# Altium footprint library FTP.PcbLib: 207 footprints (part 13 of 13)
Each footprint in its own frame and in the unit in brackets; x right, y up, seen from the top. Pads: shape width x height; smd on the part's side, far side on the other; paste and mask are expansions set on the pad; w line width, h text height; cw(c..) or ccw(c..) is an arc to the next point about the centre after c.
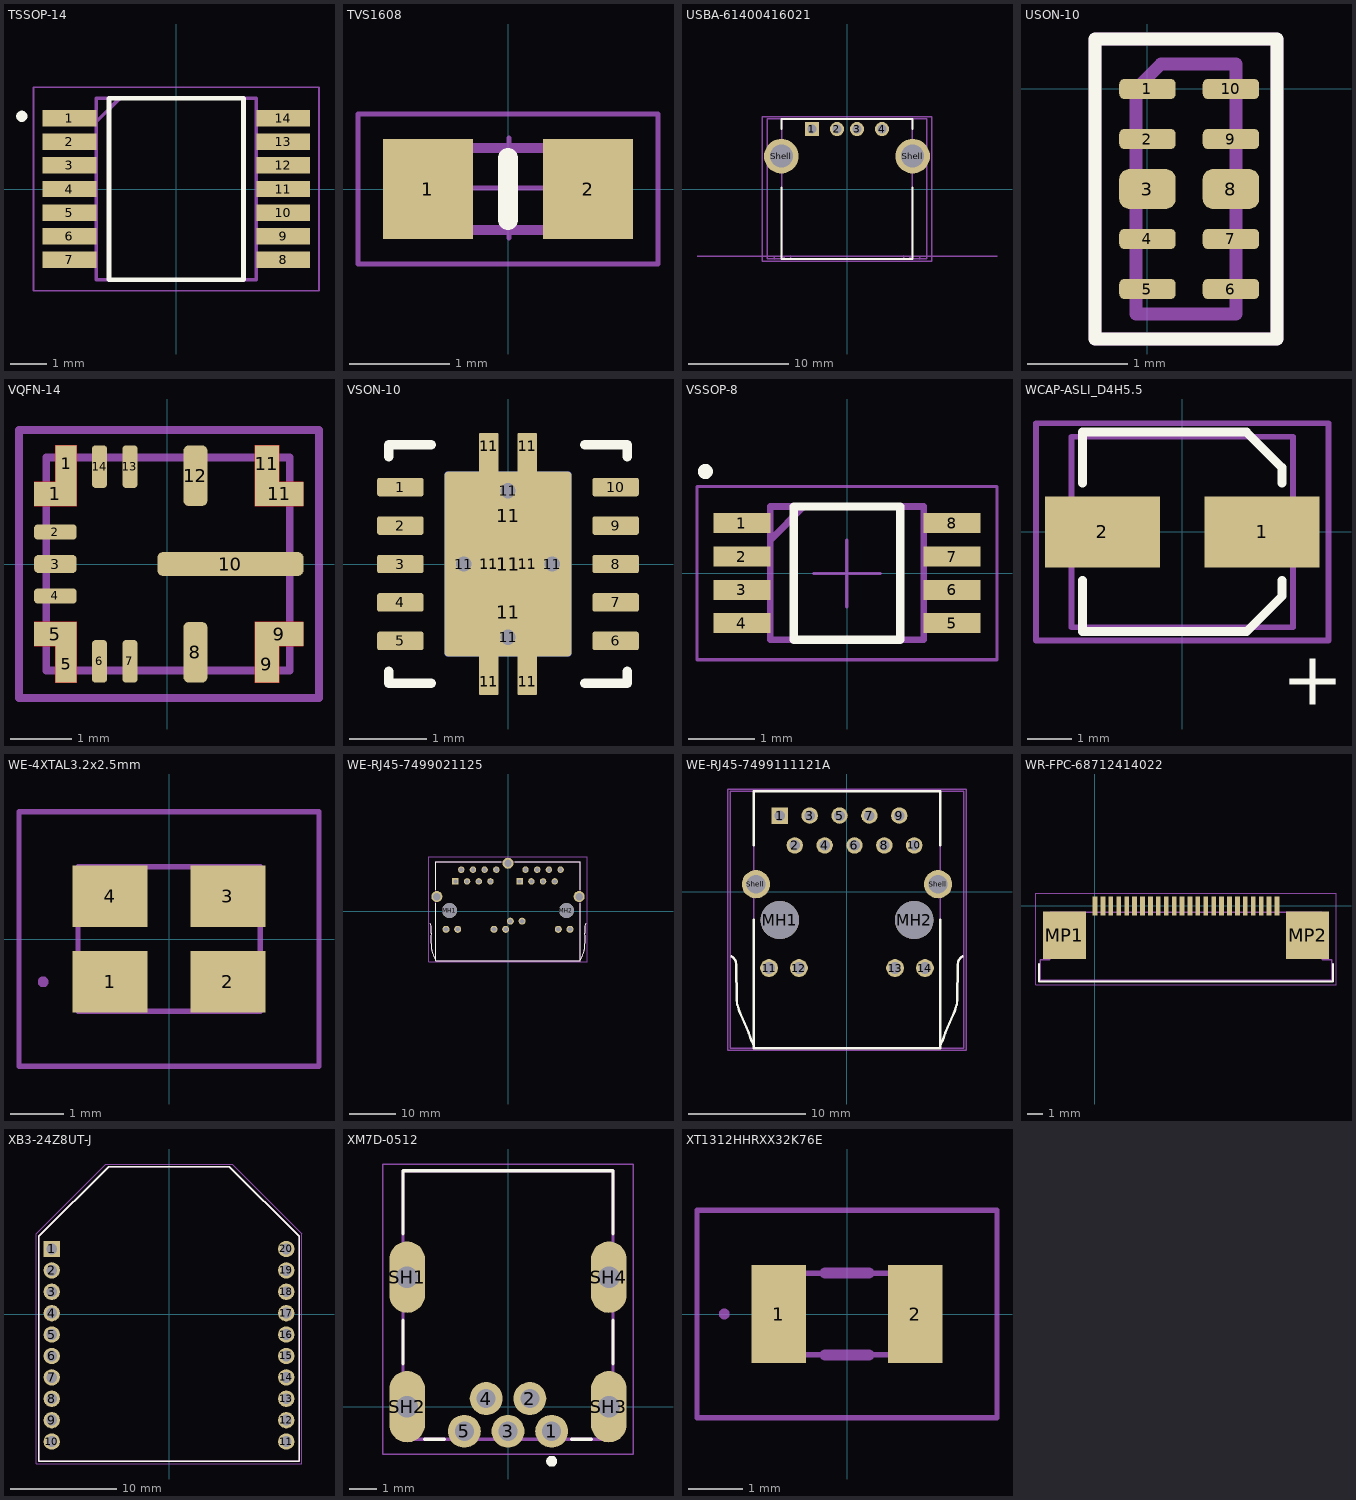
[diagram p12: the footprints below, top view; thin cyan lines are the x and y axes]

## TSSOP-14 [mm]
pads (14):
  rect 1.475x0.45 smd: 1(-2.938,1.95) 2(-2.938,1.3) 3(-2.938,0.65) 4(-2.938,0) 5(-2.938,-0.65) 6(-2.938,-1.3) 7(-2.938,-1.95) 8(2.938,-1.95) 9(2.938,-1.3) 10(2.938,-0.65) 11(2.938,0) 12(2.938,0.65) 13(2.938,1.3) 14(2.938,1.95)
Top Overlay:
  circle w0.152: c-4.25,2 r0.076
  lines w0.127: -1.85,-2.5 1.85,-2.5 1.85,2.5 -1.85,2.5 -1.85,-2.5
Mechanical 13:
  lines w0.1: -2.2,1.85 -1.55,2.5 ; -2.2,-2.5 2.2,-2.5 2.2,2.5 -2.2,2.5 -2.2,-2.5
Mechanical 15:
  lines w0.05: -3.925,-2.8 3.925,-2.8 3.925,2.8 -3.925,2.8 -3.925,-2.8
3D body "OP462HRUZ-REEL.stp": height 1.2, standoff 0, extent -3.2,-2.5 3.2,2.5

## TVS1608 [mm]
pads (2):
  rect 0.9x1 smd: 1(-0.8,0) 2(0.8,0)
Top Overlay:
  lines w0.2: 0,-0.312 0,0.312
Mechanical 13:
  lines w0.1: -0.8,-0.412 -0.8,0.412 0.8,0.412 0.8,-0.412 -0.8,-0.412
Mechanical 15:
  lines w0.05: -0.488,0.01 0.512,0.01 ; 0.012,-0.49 0.012,0.51 ; -1.5,-0.75 -1.5,0.75 1.5,0.75 1.5,-0.75 -1.5,-0.75
3D body "PESD0603-240.stp": height 0.55, standoff 0, extent -0.8,-0.412 0.8,0.413

## USBA-61400416021 [mm]
height 6.9
pads (6):
  rect 1.42x1.42 hole 0.92: 1(-3.5,5.99)
  round 1.42 hole 0.92: 2(-1,5.99) 3(1,5.99) 4(3.5,5.99)
  round 3.45 hole 2.3: Shell(-6.57,3.28) Shell(6.57,3.28)
Top Overlay:
  lines w0.2: -6.55,0.15 -6.55,-7 6.55,-7 6.55,0.15 ; -6.55,5.99 -6.55,7 6.55,7 6.55,5.99
  text "." at -3.5,8.1 h0.76
3D Body Top:
  lines w0.127: -15,-6.7 15,-6.7
Mechanical 13:
  lines w0.127: -7.25,-7 -6.56,-7 ccw(c-6.55,-6.7) -6.25,-6.7 -5.65,-6.7 -5.65,-7 5.65,-7 5.65,-6.7 6.25,-6.7 ccw(c6.55,-6.7) 6.56,-7 7.25,-7 7.25,-6.7 6.55,-6.7 6.55,7 -6.55,7 -6.55,-6.7 -7.25,-6.7 -7.25,-7
Mechanical 15:
  lines w0.127: -8.495,-7.2 8.495,-7.2 8.495,7.2 -8.495,7.2 -8.495,-7.2 ; -6.55,-7 6.55,-7 6.55,7 -6.55,7 -6.55,-7
  text "+" at -0.493,-0.767 h1.5
Mechanical 16:
  lines w0.127: -7.999,-7 7.999,-7 7.999,7 -7.999,7 -7.999,-7
3D body "61400416021.stp": height 7.63, standoff -4.06, extent -7.999,-7 7.999,7

## USON-10 [mm]
pads (10):
  rrect50% 0.565x0.2 smd mask+0.07: 1(0,0) 2(0,-0.5) 4(0,-1.5) 5(0,-2) 6(0.835,-2) 7(0.835,-1.5) 9(0.835,-0.5) 10(0.835,0)
  rrect50% 0.565x0.4 smd mask+0.07: 3(0,-1) 8(0.835,-1)
Top Overlay:
  lines w0.127: -0.525,-2.5 -0.525,0.5 1.295,0.5 1.295,-2.5 -0.525,-2.5
  text "." at -1.1,-0.1 h0.5
Mechanical 13:
  lines w0.127: -0.115,-2.25 0.885,-2.25 0.885,0.25 0.135,0.25 -0.115,0 -0.115,-2.25
Mechanical 15:
  lines w0.127: -0.525,-2.5 -0.525,0.5 1.295,0.5 1.295,-2.5 -0.525,-2.5
3D body "User Library-UDFN10.STEP": height 0.54, standoff -0.01, extent -0.079,-2.263 0.931,0.237

## VQFN-14 [mm]
pads (18):
  rect 0.7x0.4 smd paste-403.566 mask-403.566: 1(-1.837,1.15) 5(-1.837,-1.15)
  rect 0.35x0.6 smd paste-403.566 mask-403.566: 1(-1.662,1.65) 5(-1.662,-1.65)
  rrect50% 0.7x0.25 smd mask+0.07: 2(-1.837,0.525) 4(-1.837,-0.525)
  rrect50% 0.7x0.3 smd mask+0.07: 3(-1.837,0)
  rrect50% 0.25x0.7 smd mask+0.07: 6(-1.112,-1.6) 7(-0.612,-1.6) 13(-0.612,1.6) 14(-1.112,1.6)
  rrect50% 0.4x1 smd mask+0.07: 8(0.463,-1.45) 12(0.463,1.45)
  rect 0.4x0.6 smd paste-403.566 mask-403.566: 9(1.638,-1.65) 11(1.638,1.65)
  rect 0.8x0.4 smd paste-403.566 mask-403.566: 9(1.838,-1.15) 11(1.838,1.15)
  rrect50% 2.4x0.4 smd mask+0.07: 10(1.038,0)
Top Layer:
  region: -1.488,-1.951 -1.838,-1.951 -1.839,-1.351 -2.187,-1.351 -2.188,-0.951 -1.488,-0.951
  region: 1.436,-1.951 1.835,-1.951 1.836,-1.95 1.836,-1.351 2.235,-1.351 2.236,-1.351 2.236,-0.951 1.436,-0.951
  region: 1.436,1.951 1.835,1.951 1.836,1.95 1.836,1.351 2.235,1.351 2.236,1.351 2.236,0.951 1.436,0.951
  region: -1.488,1.951 -1.838,1.951 -1.839,1.351 -2.187,1.351 -2.188,0.951 -1.488,0.951
Top Overlay:
  text "." at -3.36,1.427 h0.76
Mechanical 13:
  lines w0.127: -1.987,-1.75 -1.987,1.75 2.012,1.75 2.012,-1.75 -1.987,-1.75
Mechanical 15:
  lines w0.127: -2.436,-2.2 -2.436,2.2 2.492,2.2 2.492,-2.2 -2.436,-2.2
  text "+" at -0.501,-0.752 h1.5
3D body "LM62435CPPQRJRRQ1.stp": height 1.1, standoff 0, extent -1.987,-1.75 2.012,1.75

## VSON-10 [mm]
pads (24):
  rrect20% 0.6x0.24 smd mask+0.07: 1(-1.4,1) 2(-1.4,0.5) 3(-1.4,0) 4(-1.4,-0.5) 5(-1.4,-1) 6(1.4,-1) 7(1.4,-0.5) 8(1.4,0) 9(1.4,0.5) 10(1.4,1)
  round 0.3 hole 0.2 mask+0.07: 11(-0.575,0) 11(0,-0.95) 11(0,0.95) 11(0.575,0)
  rrect5% 0.25x0.34 on Top Paste mask+0.07: 11(-0.25,-1.53) 11(-0.25,1.53) 11(0.25,-1.53) 11(0.25,1.53)
  rrect5% 0.25x3.4 smd paste-5 mask+0.07: 11(-0.25,0) 11(0.25,0)
  rrect5% 1.5x1.06 on Top Paste mask+0.07: 11(0,-0.63) 11(0,0.63)
  rrect5% 1.65x2.4 smd paste-5 mask+0.07: 11(0,0)
  rrect5% 1.65x2.4 smd far side paste-5 mask+0.07: 11(0,0)
Top Overlay:
  lines w0.127: -1.55,-1.396 -1.55,-1.55 -1,-1.55 ; -1.55,1.396 -1.55,1.55 -1,1.55 ; 1,-1.55 1.55,-1.55 1.55,-1.396 ; 1,1.55 1.55,1.55 1.55,1.396
3D body "User Library-PVSON-10-1.step": height 0.9, standoff 0, extent -1.501,-1.501 1.501,1.501

## VSSOP-8 [mm]
pads (8):
  rect 0.85x0.3 smd: 1(-1.575,0.75) 2(-1.575,0.25) 3(-1.575,-0.25) 4(-1.575,-0.75) 5(1.575,-0.75) 6(1.575,-0.25) 7(1.575,0.25) 8(1.575,0.75)
Top Overlay:
  circle w0.127: c-2.125,1.525 r0.05
  lines w0.127: -0.8,-1 0.8,-1 0.8,1 -0.8,1 -0.8,-1
Mechanical 13:
  lines w0.1: -1.15,0.5 -0.65,1 ; -1.15,-1 1.15,-1 1.15,1 -1.15,1 -1.15,-1
Mechanical 15:
  lines w0.05: -0.503,-0.005 0.497,-0.005 ; -0.003,-0.505 -0.003,0.495 ; -2.25,-1.3 2.25,-1.3 2.25,1.3 -2.25,1.3 -2.25,-1.3
3D body "SN74LVC3G07DCUR.stp": height 0.9, standoff 0, extent -1.55,-1 1.55,1

## WCAP-ASLI_D4H5.5 [mm]
height 5.5
pads (2):
  rect 2.6x1.6 smd: 1(1.8,0) 2(-1.8,0)
Top Overlay:
  lines w0.2: -2.25,-1.1 -2.25,-2.25 1.45,-2.25 2.25,-1.45 2.25,-1.1 ; -2.25,1.1 -2.25,2.25 1.45,2.25 2.25,1.45 2.25,1.1
  text "+" at 2.25,-3.9 h1.22
Mechanical 13:
  lines w0.127: -2.5,-2.15 -2.5,2.15 2.5,2.15 2.5,-2.15 -2.5,-2.15
Mechanical 15:
  lines w0.127: -3.3,-2.45 3.3,-2.45 3.3,2.45 -3.3,2.45 -3.3,-2.45
  text "+" at -0.508,-0.751 h1.5
3D body "4x5.5x1.stp": height 5.5, standoff 0, extent -2.5,-2.15 2.5,2.15

## WE-4XTAL3.2x2.5mm [mil]
pads (4):
  rect 55.12x45.28 smd: 1(-43.31,-31.5) 2(43.31,-31.5) 3(43.31,31.5) 4(-43.31,31.5)
Assembly Bottom:
  lines w3.94: -110.24,-93.5 110.24,-93.5 110.24,93.5 -110.24,93.5 -110.24,-93.5 ; -66.93,-53.15 66.93,-53.15 66.93,53.15 -66.93,53.15 -66.93,-53.15
3D Body Bottom:
  lines w3.94: -94.49,-31.5 ccw(c-92.52,-31.5) -90.55,-31.5 ccw(c-92.52,-31.5) -94.49,-31.5

## WE-RJ45-7499021125 [mm]
height 15.21
pads (29):
  rect 1.4x1.4 hole 0.89: A1(-11.43,6.5) B1(2.54,6.5)
  round 1.4 hole 0.89: A2(-10.16,9.04) A3(-8.89,6.5) A4(-7.62,9.04) A5(-6.35,6.5) A6(-5.08,9.04) A7(-3.81,6.5) A8(-2.54,9.04) B2(3.81,9.04) B3(5.08,6.5) B4(6.35,9.04) B5(7.62,6.5) B6(8.89,9.04) B7(10.16,6.5) B8(11.43,9.04)
  round 1.52 hole 1.02: A9(-13.47,-3.91) A10(-10.93,-3.91) A11(-3.05,-3.91) A12(-0.51,-3.91) B9(0.51,-2.14) B10(3.05,-2.14) B11(10.93,-3.91) B12(13.47,-3.91)
  round 3.25 hole 3.25 unplated: MH1(-12.7,0.15) MH2(12.7,0.15)
  round 2.4 hole 1.63: Shell(-15.465,3.2) Shell(0,10.44) Shell(15.465,3.2)
Top Overlay:
  lines w0.2: -16.862,-2.641 cw(c-17.973,-3.253) -16.706,-3.31 -16.713,-4.722 ccw(c-13.098,-5.162) -16.74,-5.192 ccw(c7.924,-6.02) -16.669,-8.064 ccw(c-8.25,-6.545) -15.7,-10.75 ; -15.7,1.7 -15.7,-10.75 ; -15.7,4.7 -15.7,10.75 -1.45,10.75 ; 1.45,10.75 15.7,10.75 15.7,4.7 ; 15.7,1.7 15.7,-10.75 ; 16.862,-2.641 ccw(c17.973,-3.253) 16.706,-3.31 16.713,-4.722 cw(c13.098,-5.162) 16.74,-5.192 cw(c-7.924,-6.02) 16.669,-8.064 cw(c8.25,-6.545) 15.7,-10.75 ; -15.7,-10.75 15.7,-10.75
Mechanical 11:
  text "+" at -0.507,-0.754 h1.5
Mechanical 13:
  lines w0.1: -16.862,-2.641 cw(c-17.973,-3.253) -16.706,-3.31 -16.713,-4.722 ccw(c-13.098,-5.162) -16.74,-5.192 ccw(c7.924,-6.02) -16.669,-8.064 ccw(c-8.25,-6.545) -15.7,-10.75 ; 16.862,-2.641 ccw(c17.973,-3.253) 16.706,-3.31 16.713,-4.722 cw(c13.098,-5.162) 16.74,-5.192 cw(c-7.924,-6.02) 16.669,-8.064 cw(c8.25,-6.545) 15.7,-10.75 ; -15.7,-10.75 -15.7,10.75 15.7,10.75 15.7,-10.75 ; -15.7,-10.75 15.7,-10.75
Mechanical 15:
  lines w0.127: -17.2,-10.95 -17.2,11.84 17.2,11.84 17.2,-10.95 -17.2,-10.95
3D body "7499021125.stp": height 14.81, standoff -3.66, extent -16.923,-10.75 16.923,10.75

## WE-RJ45-7499111121A [mm]
pads (18):
  rect 1.4x1.4 hole 0.9: 1(-5.715,6.485)
  round 1.4 hole 0.9: 2(-4.445,3.945) 3(-3.175,6.485) 4(-1.905,3.945) 5(-0.635,6.485) 6(0.635,3.945) 7(1.905,6.485) 8(3.175,3.945) 9(4.445,6.485) 10(5.715,3.945)
  round 1.52 hole 1.02: 11(-6.63,-6.485) 12(-4.09,-6.485) 13(4.09,-6.485) 14(6.63,-6.485)
  round 3.25 hole 3.25 unplated: MH1(-5.715,-2.405) MH2(5.715,-2.405)
  round 2.4 hole 1.6: Shell(-7.745,0.645) Shell(7.745,0.645)
Top Overlay:
  lines w0.2: -9.83,-5.484 cw(c-10.225,-6.175) -9.428,-6.175 -9.37,-9.275 ccw(c-8.1,-9.275) -9.27,-9.769 ccw(c-6.8,-9.275) -9.012,-10.48 -8.345,-12.039 ccw(c-2,-10.155) -7.94,-13.075 ; -7.94,-2.375 -7.94,-13.295 7.94,-13.295 7.94,-2.375 ; -7.94,3.945 -7.94,8.545 7.94,8.545 7.94,3.945 ; 7.94,-13.075 ccw(c2,-10.155) 8.345,-12.039 9.012,-10.48 ccw(c6.8,-9.275) 9.27,-9.769 ccw(c8.1,-9.275) 9.37,-9.275 9.428,-6.175 cw(c10.225,-6.175) 9.83,-5.484
  text "." at -5.9,9.525 h0.76
Mechanical 13:
  lines w0.127: -9.923,-13.295 -9.923,8.545 9.923,8.545 9.923,-13.295 -9.923,-13.295 ; -9.923,-13.295 -9.923,-13.295
Mechanical 15:
  lines w0.127: -9.83,-5.484 cw(c-10.225,-6.175) -9.428,-6.175 -9.37,-9.275 ccw(c-8.1,-9.275) -9.27,-9.769 ccw(c-6.8,-9.275) -9.012,-10.48 -8.345,-12.039 ccw(c-2,-10.155) -7.94,-13.075 ; 7.94,-13.075 ccw(c2,-10.155) 8.345,-12.039 9.012,-10.48 ccw(c6.8,-9.275) 9.27,-9.769 ccw(c8.1,-9.275) 9.37,-9.275 9.428,-6.175 cw(c10.225,-6.175) 9.83,-5.484 ; -10.13,-13.495 -10.13,8.745 10.13,8.745 10.13,-13.495 -10.13,-13.495 ; -7.94,-13.295 7.94,-13.295 7.94,8.545 -7.94,8.545 -7.94,-13.295
  text "+" at -0.5,-0.8 h1.5
3D body "7499111121A.stp": height 16.01, standoff -3.57, extent -9.923,-13.295 9.923,8.545

## WR-FPC-68712414022 [mm] "ZIF Connectors, Horizontal, Top Contact, pitch 0.5mm, 24p"
height 2.25
pads (26):
  rect 0.3x1.2 smd: 1(0,0) 2(0.5,0) 3(1,0) 4(1.5,0) 5(2,0) 6(2.5,0) 7(3,0) 8(3.5,0) 9(4,0) 10(4.5,0) 11(5,0) 12(5.5,0) 13(6,0) 14(6.5,0) 15(7,0) 16(7.5,0) 17(8,0) 18(8.5,0) 19(9,0) 20(9.5,0) 21(10,0) 22(10.5,0) 23(11,0) 24(11.5,0)
  rect 2.7x3 smd: MP1(-1.93,-1.86) MP2(13.43,-1.86)
Top Overlay:
  lines w0.127: -3.525,-3.66 -3.525,-4.785 15.025,-4.785 15.025,-3.66
Mechanical 13:
  lines w0.1: -3.45,-4.71 14.95,-4.71 14.95,-3.41 14.35,-3.41 14.35,-0.41 -2.85,-0.41 -2.85,-3.41 -3.45,-3.41 -3.45,-4.71
Mechanical 15:
  lines w0.05: -3.725,-4.985 15.225,-4.985 15.225,0.8 -3.725,0.8 -3.725,-4.985
3D body "68712414022.stp": height 2.1, standoff 0, extent -3.45,-4.71 14.95,0.39

## XB3-24Z8UT-J [mm]
pads (20):
  rect 1.53x1.53 hole 1.02: 1(-10.998,6.096)
  round 1.53 hole 1.02: 2(-10.998,4.089) 3(-10.998,2.083) 4(-10.998,0.076) 5(-10.998,-1.93) 6(-10.998,-3.937) 7(-10.998,-5.944) 8(-10.998,-7.95) 9(-10.998,-9.957) 10(-10.998,-11.963) 11(10.998,-11.963) 12(10.998,-9.957) 13(10.998,-7.95) 14(10.998,-5.944) 15(10.998,-3.937) 16(10.998,-1.93) 17(10.998,0.076) 18(10.998,2.083) 19(10.998,4.089) 20(10.998,6.096)
Top Overlay:
  lines w0.127: -12.192,-13.818 12.192,-13.818 12.192,7.29 5.664,13.818 -5.664,13.818 -12.192,7.29 -12.192,-13.818
Mechanical 13:
  lines w0.127: -12.192,-13.818 -12.192,7.29 -5.664,13.818 5.664,13.818 12.192,7.29 12.192,-13.818 -12.192,-13.818
Mechanical 15:
  lines w0.05: -12.442,-14.068 -12.442,7.544 -5.918,14.068 5.918,14.068 12.442,7.544 12.442,-14.068 -12.442,-14.068
3D body "c-1-2314878-0-5-3d.stp": height 4.7, standoff -2.4, extent 9.98,-12.921 12.04,7.079
3D body "c-1-2314878-0-5-3d.stp": height 4.5, standoff -2.6, extent -11.952,-13.048 -9.892,6.952
3D body "XB3-24Z8PT-J--3DModel-STEP-56544.STEP": height 8.15, standoff 0.5, extent -12.065,-13.906 12.319,13.729

## XM7D-0512 [mm] "USB B mini"
pads (9):
  round 1.208 hole 0.7: 1(1.6,-0.9) 2(0.8,0.3) 3(0,-0.9) 4(-0.8,0.3) 5(-1.6,-0.9)
  oval 1.308x2.616 hole 0.8: SH1(-3.7,4.75) SH2(-3.7,0) SH3(3.7,0) SH4(3.7,4.75)
Top Overlay:
  circle w0.2: c1.6,-2 r0.1
  lines w0.127: -3.85,1.57 -3.85,3.18 ; -3.85,6.34 -3.85,8.65 3.85,8.65 3.85,6.34 ; -3.06,-1.2 -2.33,-1.2 ; 2.34,-1.2 3.05,-1.2 ; 3.85,1.57 3.85,3.18
Mechanical 1:
  lines w0: -4.1,-0.95 -3.3,-0.95 -3.3,0.95 -4.1,0.95 -4.1,-0.95 ; -4.1,3.8 -3.3,3.8 -3.3,5.7 -4.1,5.7 -4.1,3.8 ; 3.3,-0.95 4.1,-0.95 4.1,0.95 3.3,0.95 3.3,-0.95 ; 3.3,3.8 4.1,3.8 4.1,5.7 3.3,5.7 3.3,3.8
Courtyard Top:
  lines w0.127: -3.85,-1.2 3.85,-1.2 ; -3.85,-1.2 -3.85,8.65 ; -3.85,-1.2 3.85,-1.2 ; -3.85,-1.2 -3.85,8.65 ; -3.85,8.65 3.85,8.65 ; -3.85,8.65 3.85,8.65 ; 3.85,-1.2 3.85,8.65 ; 3.85,-1.2 3.85,8.65
Mechanical 16:
  lines w0.05: -4.6,-1.75 -4.6,8.9 4.6,8.9 4.6,-1.75 -4.6,-1.75
3D body "XM7D-0512--3DModel-STEP-56544.STEP": height 4.05, standoff -1.85, extent -4.125,-1.1 3.975,8.75

## XT1312HHRXX32K76E [mm]
pads (2):
  rect 1x1.8 smd: 1(-1.25,0) 2(1.25,0)
Assembly Bottom:
  lines w0.1: -2.75,-1.9 2.75,-1.9 2.75,1.9 -2.75,1.9 -2.75,-1.9 ; -1.6,-0.75 1.6,-0.75 1.6,0.75 -1.6,0.75 -1.6,-0.75
3D Body Bottom:
  lines w0.1: -2.3,0 cw(c-2.25,0) -2.2,0 cw(c-2.25,0) -2.3,0
  lines w0.2: -0.4,-0.75 0.4,-0.75 ; -0.4,0.75 0.4,0.75
3D body "XT1312HHRXX32K76E.stp": height 0.81, standoff 0, extent -1.6,-0.75 1.6,0.75